# Altium footprint library PcbLib1.PcbLib: 23 footprints (part 1 of 2)
Each footprint in its own frame and in the unit in brackets; x right, y up, seen from the top. Pads: shape width x height; smd on the part's side, far side on the other; paste and mask are expansions set on the pad; w line width, h text height; cw(c..) or ccw(c..) is an arc to the next point about the centre after c.
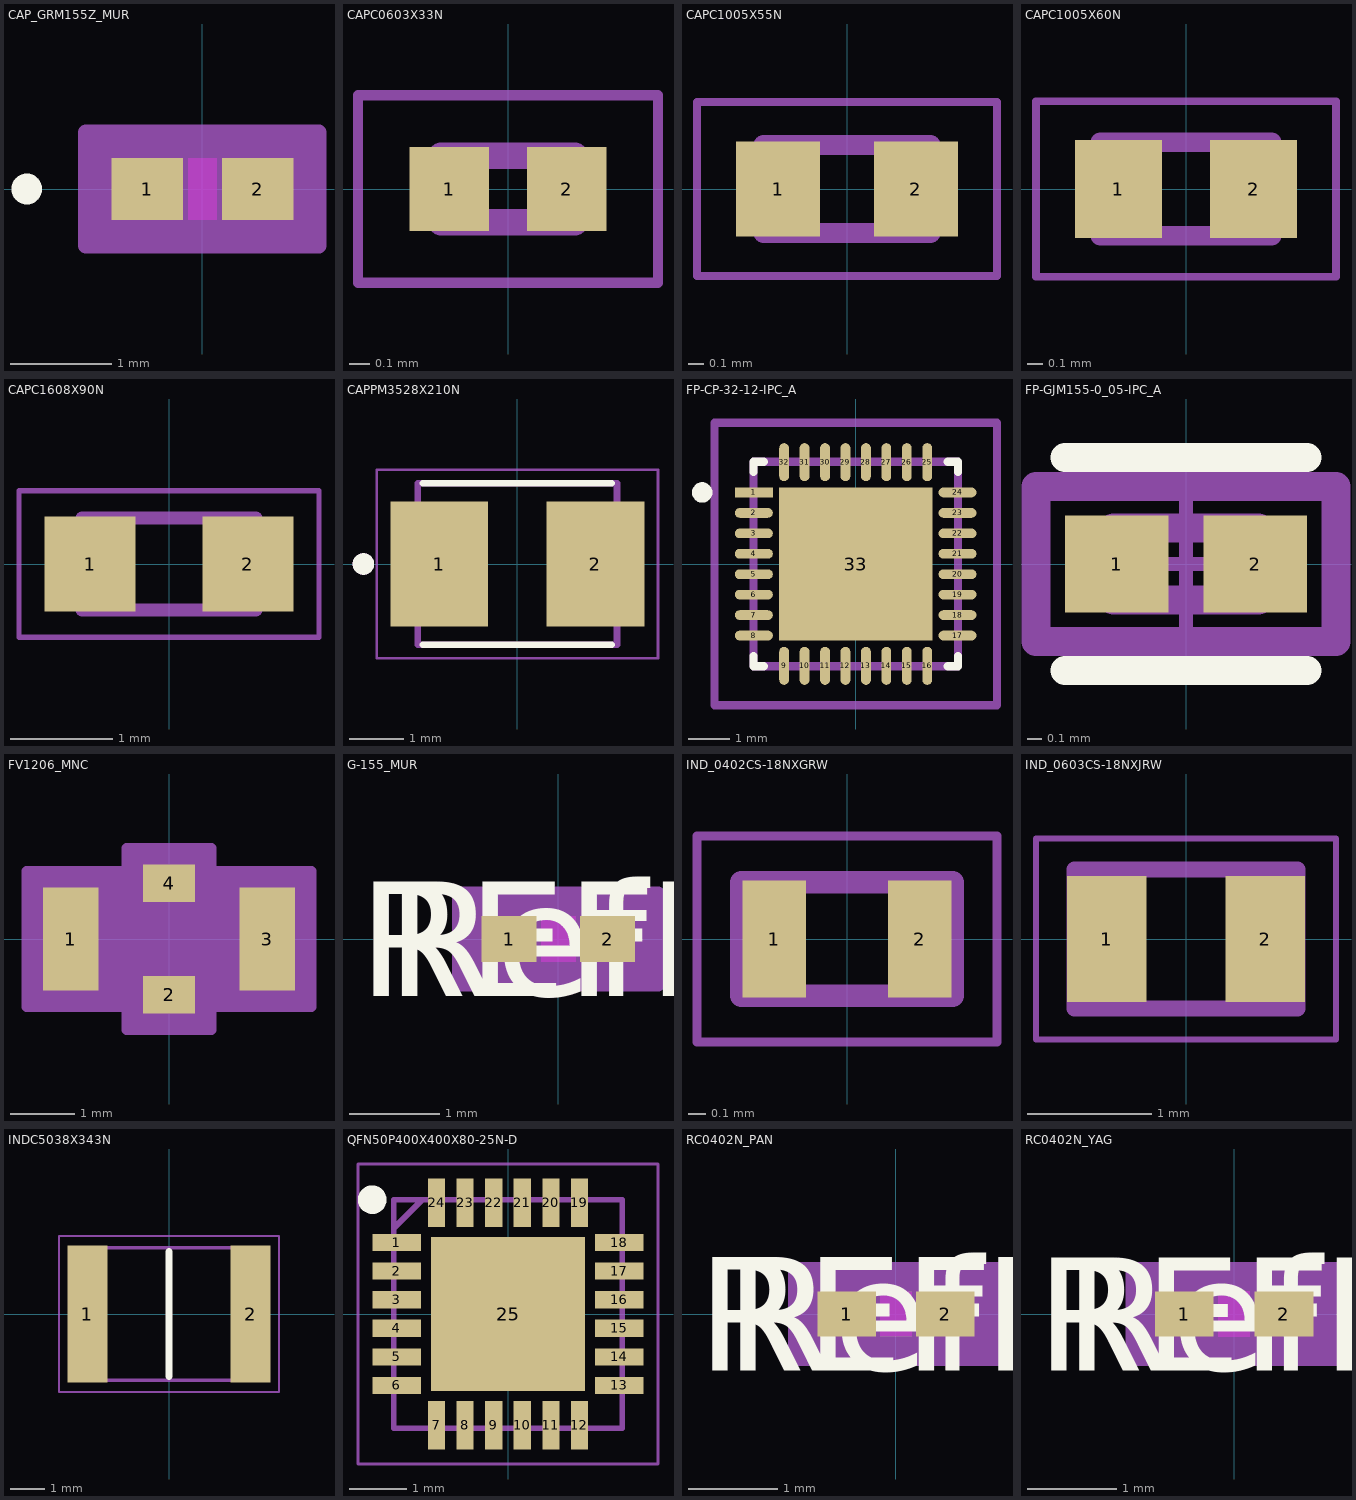
[diagram p0: the footprints below, top view; thin cyan lines are the x and y axes]

## CAP_GRM155Z_MUR [mil]
pads (2):
  rect 27.78x24 smd paste+0 mask+0: 1(-21.39,0) 2(21.39,0)
Top Layer keep-out:
  region: -5.5,-10 -5.5,10 5.5,10 5.5,-10
Top Overlay:
  circle w6: c-68.28,0 r3
  text ".Designator" at -137.5,-25 h50
Keep-Out Layer:
  region: -5.5,-12 -5.5,12 5.5,12 5.5,-12
Top 3D Body:
  circle w1: c-16.39,0 r3
  lines w1: -21.5,-12 -21.5,12 ; -21.5,-12 -7.5,-12 -7.5,12 -21.5,12 ; -21.5,-12 21.5,-12 ; -21.5,-12 -21.5,12 ; -21.5,12 21.5,12 ; 21.5,-12 7.5,-12 7.5,12 21.5,12 ; 21.5,-12 21.5,12 ; 21.5,-12 21.5,12
  text ".Designator" at -137.5,-25 h50
Mechanical 15:
  region: 45.28,-22 -45.28,-22 -45.28,22 45.28,22
  lines w6: -45.28,-22 -45.28,22 45.28,22 45.28,-22 -45.28,-22
3D body "CAP_GRM155Z_MUR.step": height 24.02, standoff 0, extent -21.5,-12.01 21.5,12.01

## CAPC0603X33N [mm]
pads (2):
  rect 0.38x0.4 smd paste+0 mask+0.102: 1(-0.281,0) 2(0.281,0)
Top 3D Body:
  lines w0.127: -0.32,-0.16 -0.32,0.16 0.32,0.16 0.32,-0.16 -0.32,-0.16
Mechanical 15:
  lines w0.05: -0.718,-0.448 -0.718,0.448 0.718,0.448 0.718,-0.448 -0.718,-0.448
3D body "step_temp.STEP": height 0.33, standoff 0, extent -0.3,-0.15 0.3,0.15

## CAPC1005X55N [mm]
pads (2):
  rect 0.53x0.6 smd: 1(-0.437,0) 2(0.437,0)
Top 3D Body:
  lines w0.127: -0.53,-0.28 -0.53,0.28 0.53,0.28 0.53,-0.28 -0.53,-0.28
Mechanical 15:
  lines w0.05: -0.95,-0.55 -0.95,0.55 0.95,0.55 0.95,-0.55 -0.95,-0.55
3D body "step_temp.STEP": height 0.55, standoff 0, extent -0.5,-0.25 0.5,0.25

## CAPC1005X60N [mm]
pads (2):
  rect 0.56x0.63 smd paste+0 mask+0.102: 1(-0.435,0) 2(0.435,0)
Top 3D Body:
  lines w0.127: -0.55,-0.3 -0.55,0.3 0.55,0.3 0.55,-0.3 -0.55,-0.3
Mechanical 15:
  lines w0.05: -0.965,-0.565 -0.965,0.565 0.965,0.565 0.965,-0.565 -0.965,-0.565
3D body "step_temp.STEP": height 0.6, standoff 0, extent -0.5,-0.25 0.5,0.25

## CAPC1608X90N [mm]
pads (2):
  rect 0.89x0.93 smd paste+0 mask+0.102: 1(-0.77,0) 2(0.77,0)
Top 3D Body:
  lines w0.127: -0.85,-0.45 -0.85,0.45 0.85,0.45 0.85,-0.45 -0.85,-0.45
Mechanical 15:
  lines w0.05: -1.465,-0.715 -1.465,0.715 1.465,0.715 1.465,-0.715 -1.465,-0.715
3D body "step_temp.STEP": height 0.9, standoff 0, extent -0.8,-0.4 0.8,0.4

## CAPPM3528X210N [mm]
pads (2):
  rect 1.81x2.32 smd paste+0 mask+0.102: 1(-1.45,0) 2(1.45,0)
Top Overlay:
  circle w0.2: c-2.857,0 r0.1
  lines w0.127: -1.75,-1.5 1.75,-1.5 ; -1.75,1.5 1.75,1.5
Top 3D Body:
  circle w0.2: c-2.857,0 r0.1
  lines w0.127: -1.85,-1.5 1.85,-1.5 1.85,1.5 -1.85,1.5 -1.85,-1.5
Mechanical 15:
  lines w0.05: -2.61,-1.75 -2.61,1.75 2.61,1.75 2.61,-1.75 -2.61,-1.75
3D body "step_temp.STEP": height 2.1, standoff 0, extent -1.75,-1.4 1.75,1.4

## FP-CP-32-12-IPC_A [mm]
pads (33):
  rect 0.931x0.239 smd paste+0 mask+0: 1(-2.491,1.75)
  rrect100% 0.931x0.239 smd paste+0 mask+0: 2(-2.491,1.25) 3(-2.491,0.75) 4(-2.491,0.25) 5(-2.491,-0.25) 6(-2.491,-0.75) 7(-2.491,-1.25) 8(-2.491,-1.75) 17(2.491,-1.75) 18(2.491,-1.25) 19(2.491,-0.75) 20(2.491,-0.25) 21(2.491,0.25) 22(2.491,0.75) 23(2.491,1.25) 24(2.491,1.75)
  rrect100% 0.239x0.931 smd paste+0 mask+0: 9(-1.75,-2.491) 10(-1.25,-2.491) 11(-0.75,-2.491) 12(-0.25,-2.491) 13(0.25,-2.491) 14(0.75,-2.491) 15(1.25,-2.491) 16(1.75,-2.491) 25(1.75,2.491) 26(1.25,2.491) 27(0.75,2.491) 28(0.25,2.491) 29(-0.25,2.491) 30(-0.75,2.491) 31(-1.25,2.491) 32(-1.75,2.491)
  rect 3.75x3.75 smd paste-1000 mask+0: 33(0,0)
Top Overlay:
  circle w0.25: c-3.756,1.75 r0.125
  lines w0.2: -2.5,-2.25 -2.5,-2.5 -2.25,-2.5 ; -2.5,2.25 -2.5,2.5 -2.25,2.5 ; 2.25,-2.5 2.5,-2.5 2.5,-2.25 ; 2.25,2.5 2.5,2.5 2.5,2.25
Top Paste:
  rectangle: -1.186,-1.186 1.186,1.186
Top Courtyard:
  lines w0.2: -3.456,-3.456 3.456,-3.456 3.456,3.456 -3.456,3.456 -3.456,-3.456
Top Assembly:
  lines w0.2: -3.456,-3.456 3.456,-3.456 3.456,3.456 -3.456,3.456 -3.456,-3.456
  text ".Designator" at 0,0.188 h1
Top 3D Body:
  lines w0.2: -2.5,-2.5 2.5,-2.5 2.5,2.5 -2.5,2.5 -2.5,-2.5
Top Component Center:
  lines w0.1: -0.5,0 0.5,0 ; 0,-0.5 0,0.5
3D body "IC_Analog_Devices_AD5423BCPZ-RL7_eec.STEP": height 0.25, standoff 0, extent -3.456,-3.456 3.456,3.456

## FP-GJM155-0_05-IPC_A [mm]
pads (2):
  rect 0.715x0.672 smd paste+0 mask+0: 1(-0.479,0) 2(0.479,0)
Top Overlay:
  lines w0.2: -0.836,-0.736 0.836,-0.736 ; -0.836,0.736 0.836,0.736
Top Courtyard:
  lines w0.2: -1.036,-0.536 1.036,-0.536 1.036,0.536 -1.036,0.536 -1.036,-0.536
Top Assembly:
  lines w0.2: -1.036,-0.536 1.036,-0.536 1.036,0.536 -1.036,0.536 -1.036,-0.536
  text ".Designator" at 0,0.188 h1
Top 3D Body:
  lines w0.2: -0.5,-0.25 0.5,-0.25 0.5,0.25 -0.5,0.25 -0.5,-0.25
Top Component Center:
  lines w0.1: -0.5,0 0.5,0 ; 0,-0.5 0,0.5
3D body "Cap_Murata_GJM1551C1H7R0DB01D_eec.STEP": height 0.25, standoff 0, extent -1.036,-0.536 1.036,0.536

## FV1206_MNC [mil]
pads (4):
  rect 34x63 smd paste+0 mask+0: 1(-60,0) 3(60,0)
  rect 32x23 smd paste+0 mask+0: 2(0,-34) 4(0,34)
Top Overlay:
  text ".Designator" at -137.5,-25 h50
Top 3D Body:
  lines w1: -63,-31.5 -63,31.5 ; -63,-31.5 -43,-31.5 -43,31.5 -63,31.5 ; -63,-31.5 63,-31.5 ; -63,-31.5 -63,31.5 ; -63,31.5 63,31.5 ; 63,-31.5 43,-31.5 43,31.5 63,31.5 ; 63,-31.5 63,31.5 ; 63,-31.5 63,31.5
  text ".Designator" at -137.5,-25 h50
Mechanical 15:
  region: -26,-41.5 -87,-41.5 -87,41.5 -26,41.5 -26,55.5 26,55.5 26,41.5 87,41.5 87,-41.5 26,-41.5 26,-55.5 -26,-55.5
  region: 63,-31.5 -63,-31.5 -63,31.5 63,31.5
  lines w6: -87,-41.5 -87,41.5 -26,41.5 -26,55.5 26,55.5 26,41.5 87,41.5 87,-41.5 26,-41.5 26,-55.5 -26,-55.5 -26,-41.5 -87,-41.5
3D body "FV1206_MNC.step": height 37.01, standoff 0, extent -62.99,-31.5 62.99,31.5

## G-155_MUR [mil]
pads (2):
  rect 24x20 smd paste+0 mask+0: 1(-21.5,0) 2(21.5,0)
Top Layer keep-out:
  region: -7.5,-8 -7.5,8 7.5,8 7.5,-8
Top Overlay:
  text "REFDES" at -87.5,-25 h50
  text "RefDes" at -75,-25 h50
Keep-Out Layer:
  region: -7.5,-10 -7.5,10 7.5,10 7.5,-10
Top 3D Body:
  lines w1: -19.5,-10 -19.5,10 ; -19.5,-10 19.5,-10 ; -19.5,-10 -9.5,-10 -9.5,10 -19.5,10 ; -19.5,-10 -19.5,10 ; -19.5,10 19.5,10 ; 19.5,-10 19.5,10 ; 19.5,-10 19.5,10 ; 19.5,-10 9.5,-10 9.5,10 19.5,10
  text "RefDes2" at -87.5,-25 h50
Mechanical 15:
  region: 43.5,-20 -43.5,-20 -43.5,20 43.5,20
  lines w6: -43.5,-20 43.5,-20 43.5,20 -43.5,20 -43.5,-20
3D body "G-155_MUR.step": height 22.01, standoff 0, extent -19.49,-10 19.49,10

## IND_0402CS-18NXGRW [mm]
height 0.66
pads (2):
  rect 0.36x0.66 smd: 1(-0.41,0) 2(0.41,0)
Top 3D Body:
  lines w0.127: -0.595,-0.32 0.595,-0.32 0.595,0.32 -0.595,0.32 -0.595,-0.32
Mechanical 15:
  lines w0.05: -0.845,-0.58 0.845,-0.58 0.845,0.58 -0.845,0.58 -0.845,-0.58

## IND_0603CS-18NXJRW [mm]
height 1.02
pads (2):
  rect 0.64x1.02 smd: 1(-0.64,0) 2(0.64,0)
Top 3D Body:
  lines w0.127: -0.9,-0.56 -0.9,0.56 0.9,0.56 0.9,-0.56 -0.9,-0.56
Mechanical 15:
  lines w0.05: -1.21,-0.81 -1.21,0.81 1.21,0.81 1.21,-0.81 -1.21,-0.81

## INDC5038X343N [mm]
pads (2):
  rect 1.15x3.95 smd: 1(-2.35,0) 2(2.35,0)
Top Overlay:
  lines w0.2: 0,-1.805 0,1.805
Mechanical 15:
  lines w0.1: -2.475,-1.905 2.475,-1.905 2.475,1.905 -2.475,1.905 -2.475,-1.905
Mechanical 20:
  lines w0.05: -3.175,-2.25 3.175,-2.25 3.175,2.25 -3.175,2.25 -3.175,-2.25

## QFN50P400X400X80-25N-D [mm]
pads (25):
  rect 0.85x0.3 smd: 1(-1.95,1.25) 2(-1.95,0.75) 3(-1.95,0.25) 4(-1.95,-0.25) 5(-1.95,-0.75) 6(-1.95,-1.25) 13(1.95,-1.25) 14(1.95,-0.75) 15(1.95,-0.25) 16(1.95,0.25) 17(1.95,0.75) 18(1.95,1.25)
  rect 0.3x0.85 smd: 7(-1.25,-1.95) 8(-0.75,-1.95) 9(-0.25,-1.95) 10(0.25,-1.95) 11(0.75,-1.95) 12(1.25,-1.95) 19(1.25,1.95) 20(0.75,1.95) 21(0.25,1.95) 22(-0.25,1.95) 23(-0.75,1.95) 24(-1.25,1.95)
  rect 2.7x2.7 smd: 25(0,0)
Top Overlay:
  circle w0.25: c-2.375,2 r0.125
Mechanical 15:
  lines w0.1: -2,1.5 -1.5,2 ; -2,-2 -2,2 2,2 2,-2 -2,-2
Mechanical 20:
  lines w0.05: -2.625,-2.625 -2.625,2.625 2.625,2.625 2.625,-2.625 -2.625,-2.625

## RC0402N_PAN [mm]
pads (2):
  rect 0.65x0.5 smd paste+0 mask+0: 1(-0.55,0) 2(0.55,0)
Top Layer keep-out:
  region: -0.174,-0.199 -0.174,0.199 0.174,0.199 0.174,-0.199
Top Overlay:
  text "RefDes" at -1.905,-0.635 h1.27
  text "REFDES" at -2.222,-0.635 h1.27
Keep-Out Layer:
  region: -0.174,-0.25 -0.174,0.25 0.174,0.25 0.174,-0.25
Top 3D Body:
  lines w0.025: -0.525,-0.25 -0.525,0.25 ; -0.525,-0.25 -0.225,-0.25 -0.225,0.25 -0.525,0.25 ; -0.525,-0.25 0.525,-0.25 ; -0.525,-0.25 -0.525,0.25 ; -0.525,0.25 0.525,0.25 ; 0.525,-0.25 0.225,-0.25 0.225,0.25 0.525,0.25 ; 0.525,-0.25 0.525,0.25 ; 0.525,-0.25 0.525,0.25
  text "RefDes2" at -2.222,-0.635 h1.27
Mechanical 15:
  region: 1.129,-0.504 -1.129,-0.504 -1.129,0.504 1.129,0.504
  lines w0.152: -1.129,-0.504 -1.129,0.504 1.129,0.504 1.129,-0.504 -1.129,-0.504
3D body "RC0402N_PAN.step": height 0.71, standoff 0, extent -0.525,-0.25 0.525,0.25

## RC0402N_YAG [mil]
pads (2):
  rect 26x20 smd paste+0 mask+0: 1(-22,0) 2(22,0)
Top Layer keep-out:
  region: -7,-8 -7,8 7,8 7,-8
Top Overlay:
  text "RefDes" at -75,-25 h50
  text "REFDES" at -87.5,-25 h50
Keep-Out Layer:
  region: -7,-10 -7,10 7,10 7,-10
Top 3D Body:
  lines w1: -21,-10 -21,10 ; -21,-10 -9,-10 -9,10 -21,10 ; -21,-10 21,-10 ; -21,-10 -21,10 ; -21,10 21,10 ; 21,-10 9,-10 9,10 21,10 ; 21,-10 21,10 ; 21,-10 21,10
  text "RefDes2" at -87.5,-25 h50
Mechanical 15:
  region: 45,-20 -45,-20 -45,20 45,20
  lines w6: -45,-20 -45,20 45,20 45,-20 -45,-20
3D body "RC0402N_YAG.step": height 27.99, standoff 0, extent -20.98,-10 20.98,10